# EAGLE library part SC7A20H (library SC7A20H)
Silan SC7A20H 3軸加速度計 (±2/4/8/16 g、12 bit、1.71〜3.6 V)。 I2C で使うとき: CS (10番) は内部で VDDIO にプルアップされているので未接続でよい。SDO (1番) は未接続か High でアドレス 0x19、Low で 0x18 (Low にすると内部プルアップに電流が流れるので、未接続を勧める)。RES は SC7A20H のデータシートの 4番 NC で、GND につなぐ (I2C/SPI のどちらでも GND)。11番 NC は未接続。 VDD と VDDIO にそれぞれ 100 nF。I2C のプルアップはデータシートの推奨 4.7 kΩ。INT1・INT2 は既定でプッシュプル、割り込みで High。 WHO_AM_I (0x0F) = 0x11。
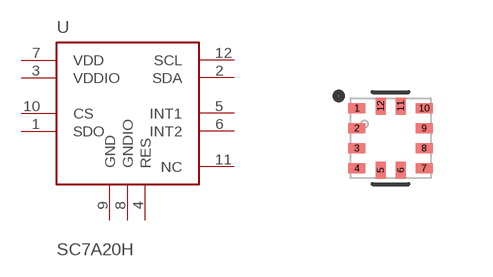
[diagram p0: symbol with the pads of LGA-12_2X2X1.0_SC7A20H; footprint LGA-12_2X2X1.0_SC7A20H]

Designator prefix U

## SC7A20H (MANUFACTURER: Silan; MPN: SC7A20HTR)  [LGA-12_2X2X1.0_SC7A20H]
1  SDO
2  SDA
3  VDDIO  pwr
4  RES  pas
5  INT1  out
6  INT2  out
7  VDD  pwr
8  GNDIO  pwr
9  GND  pwr
10  CS  in
11  NC  nc
12  SCL  in

## Footprint LGA-12_2X2X1.0_SC7A20H (pad centres in mm)
LGA-12 2×2×1.0 mm (SC7A20H)。部品面から見た図で、1番は左上。原点は本体の中心。 端子 (データシート): 0.325 × 0.25 mm (b × b1)、ピッチ 0.5 mm、左右の列の中心間 1.58 mm (E1)、上下の行の中心間 1.50 mm (D1)。四隅と左右の端子は横長、上下の内側の端子 (5・6・11・12番) は縦長。 ランドは端子より外向きに 0.1 mm 延ばした (手はんだやホットエアで載せ替えるとき、はんだが見えるように)。内向きは端子と同じ。
smd 0.425 x 0.25: 1 -0.84,0.75; 2 -0.84,0.25; 3 -0.84,-0.25; 4 -0.84,-0.75; 7 0.84,-0.75; 8 0.84,-0.25; 9 0.84,0.25; 10 0.84,0.75
smd 0.25 x 0.425: 5 -0.25,-0.8; 6 0.25,-0.8; 11 0.25,0.8; 12 -0.25,0.8